# Altium schematic symbol library 1776275-2.SchLib: 1 symbol
Pins are listed as number, name and electrical type; pins without a type are passive.

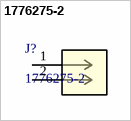
[diagram p0: symbol 1776275-2]

## 1776275-2
designator J?
2P TB ,90deg,VT,3.5mm,Blue,w/interlock; Manufacturer_Name: TE Connectivity; TYPE: Receptacle; Copyright: Copyright (C) 2025 Ultra Librarian. All rights reserved.; Manufacturer_Part_Number: 1776275-2; RefDes: RefDes
footprint CONN2_1776275-2
pins: 1, 2